# Altium footprint library PcbLib1.PcbLib: 37 footprints (part 3 of 3)
Each footprint in its own frame and in the unit in brackets; x right, y up, seen from the top. Pads: shape width x height; smd on the part's side, far side on the other; paste and mask are expansions set on the pad; w line width, h text height; cw(c..) or ccw(c..) is an arc to the next point about the centre after c.
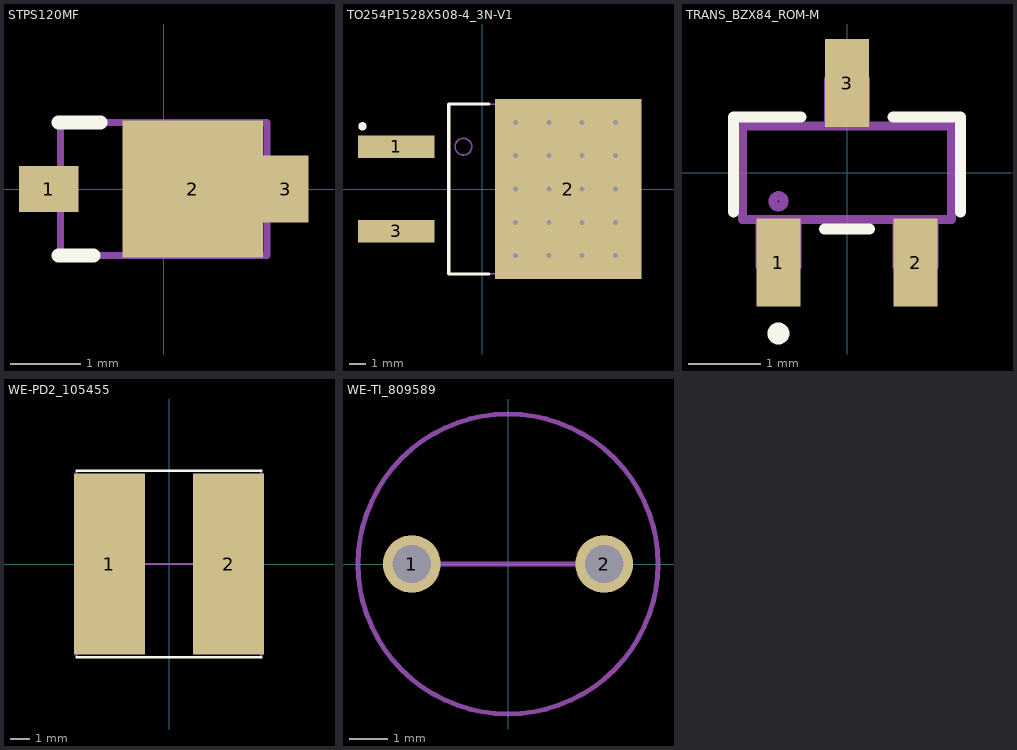
[diagram p2: the footprints below, top view; thin cyan lines are the x and y axes]

## STPS120MF [mm]
pads (3):
  rect 0.85x0.65 smd: 1(-1.64,0)
  rect 2x1.95 smd: 2(0.415,0)
  rect 0.65x0.95 smd: 3(1.74,0)
Top Overlay:
  lines w0.2: -1.5,-0.95 -1,-0.95 ; -1.5,0.95 -0.9,0.95
Mechanical 13:
  lines w0.1: -1.475,-0.95 -1.475,0.95 1.475,0.95 1.475,-0.95 -1.475,-0.95
  text ".Designator" at -1.788,-0.428 h1.1
3D body "STPS120MF.stp": height 0.85, standoff 0, extent -1.855,-0.961 1.945,0.961

## TO254P1528X508-4_3N-V1 [mm] "TO,2.54mm pitch;3 pin,15.28mm L X 9.00mm W X 5.08mm H body"
height 5.08
pads (3):
  rect 4.6x1.35 smd paste-0.05 mask+0: 1(-5.155,2.54) 3(-5.155,-2.54)
  rect 8.8x10.8 smd paste-4.4 mask+0: 2(5.155,0)
via 8,-2 diameter 0.7 hole 0.3
via 8,4 diameter 0.7 hole 0.3
via 8,2 diameter 0.7 hole 0.3
via 8,0 diameter 0.7 hole 0.3
via 8,-4 diameter 0.7 hole 0.3
via 6,-2 diameter 0.7 hole 0.3
via 6,4 diameter 0.7 hole 0.3
via 6,2 diameter 0.7 hole 0.3
via 6,0 diameter 0.7 hole 0.3
via 6,-4 diameter 0.7 hole 0.3
via 4,-2 diameter 0.7 hole 0.3
via 4,4 diameter 0.7 hole 0.3
via 4,2 diameter 0.7 hole 0.3
via 4,0 diameter 0.7 hole 0.3
via 4,-4 diameter 0.7 hole 0.3
via 2,-2 diameter 0.7 hole 0.3
via 2,4 diameter 0.7 hole 0.3
via 2,2 diameter 0.7 hole 0.3
via 2,0 diameter 0.7 hole 0.3
via 2,-4 diameter 0.7 hole 0.3
Top Overlay:
  circle w0.25: c-7.188,3.765 r0.125
  lines w0.2: 0.4,-5.1 -2,-5.1 -2,5.1 0.4,5.1
Top Paste:
  region: 5.305,-0.15 9.505,-0.15 9.505,-5.35 5.305,-5.35
  region: 0.805,-0.15 5.005,-0.15 5.005,-5.35 0.805,-5.35
  region: 5.305,0.15 9.505,0.15 9.505,5.35 5.305,5.35
  region: 0.805,5.35 5.005,5.35 5.005,0.15 0.805,0.15
Mechanical 13:
  circle w0.1: c-1.125,2.54 r0.5
  lines w0.1: -1.986,-5.08 7.014,-5.08 7.014,5.08 -1.986,5.08 -1.986,-5.08
  text ".Designator" at -1.238,-0.328 h1.1
3D body "PG-TO263-3-901_Z8B00200767_V01_3D.stp": height 5.09, standoff 0, extent -6.59,-5.08 8.69,5.08

## TRANS_BZX84_ROM-M [mil]
pads (3):
  rect 24x48 smd paste+0 mask+0: 1(-37.4,-49) 2(37.4,-49) 3(0,49)
Top Overlay:
  circle w6: c-37.4,-87.6 r3
  lines w6: -62,-21.41 -62,30.5 -25.1,30.5 ; -12.3,-30.5 12.3,-30.5 ; 25.1,30.5 62,30.5 62,-21.41
Mechanical 13:
  circle w5: c-37.4,-15.5 r3
  lines w5: -57,-25.5 57,-25.5 57,25.5 -57,25.5 -57,-25.5 ; -47.4,-51 -47.4,-25.5 -27.4,-25.5 -27.4,-51 -47.4,-51 ; -10,25.5 10,25.5 10,51 -10,51 -10,25.5 ; 27.4,-51 27.4,-25.5 47.4,-25.5 47.4,-51 27.4,-51
  text ".Designator" at -39.53,-15.95 h43.31
3D body "TRANS_BZX84_ROM.step": height 45.12, standoff 0, extent -57.01,-50.98 57.01,50.98

## WE-PD2_105455 [mm]
pads (2):
  rect 3.75x9.5 smd: 1(-3.125,0) 2(3.125,0)
Top Overlay:
  lines w0.127: -4.858,-4.895 4.84,-4.895 ; -4.858,4.895 4.84,4.895
Mechanical 13:
  lines w0.127: -4.858,-4.895 -4.858,4.895 ; -3.125,0 3.125,0 ; 4.84,-4.895 4.84,4.895
  text ".Designator" at -4.538,0.347 h1.1
3D body "744776112.stp": height 5.4, standoff 0, extent -5.045,-4.5 5.045,4.5

## WE-TI_809589 [mm]
pads (2):
  round 1.5 hole 1: 1(-2.5,0) 2(2.5,0)
Mechanical 13:
  circle w0.127: c0,0 r3.9
  lines w0.127: -2.5,0 2.5,0
  text ".Designator" at -3.488,0.322 h1.1
3D body "7447720150.stp": height 9.38, standoff -5.12, extent -3.9,-3.9 3.9,3.9